# EAGLE library part R15-100B (library R15-100B)
Recom 5W Isolated DC-DC Converter, Vin 14 17 V dc, Vout 55 135V dc, I/O isolation 3000V dc Source: Datasheet <https://recom-power.com/pdf/Innoline/Rxx-B.pdf>
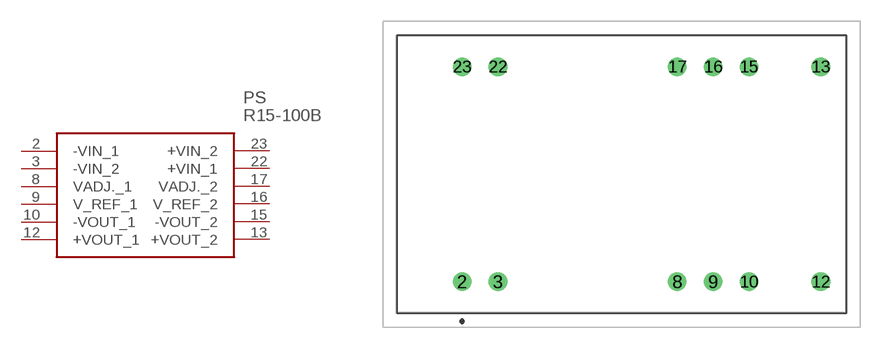
[diagram p0: symbol with the pads of R15100B; footprint R15100B]

Designator prefix PS

## R15-100B (Description: Recom 5W Isolated DC-DC Converter, Vin 14 17 V dc, Vout 55 135V dc, I/O isolation 3000V dc; Height: 9.9mm; Manufacturer_Name: RECOM Power; Manufacturer_Part_Number: R15-100B; Mouser_Part_Number: 919-R15-100B; Mouser_Price-Stock: https://www.mouser.co.uk/ProductDetail/RECOM-Power/R15-100B?qs=3sBZtWOgbidQ9DaE4LFYPA%3D%3D)  [R15100B]
2  -VIN_1
3  -VIN_2
8  VADJ._1
9  V_REF_1
10  -VOUT_1
12  +VOUT_1
13  +VOUT_2
15  -VOUT_2
16  V_REF_2
17  VADJ._2
22  +VIN_1
23  +VIN_2

## Footprint R15100B (pad centres in mm)
R15-100B-1
drill 0.81 pad 1.316: 2 0,0; 3 2.54,0; 8 15.24,0; 9 17.78,0; 10 20.32,0; 12 25.4,0; 13 25.4,15.24; 15 20.32,15.24; 16 17.78,15.24; 17 15.24,15.24; 22 2.54,15.24; 23 0,15.24